# Altium schematic symbol library Robert_.SchLib: 177 symbols (part 6 of 6)
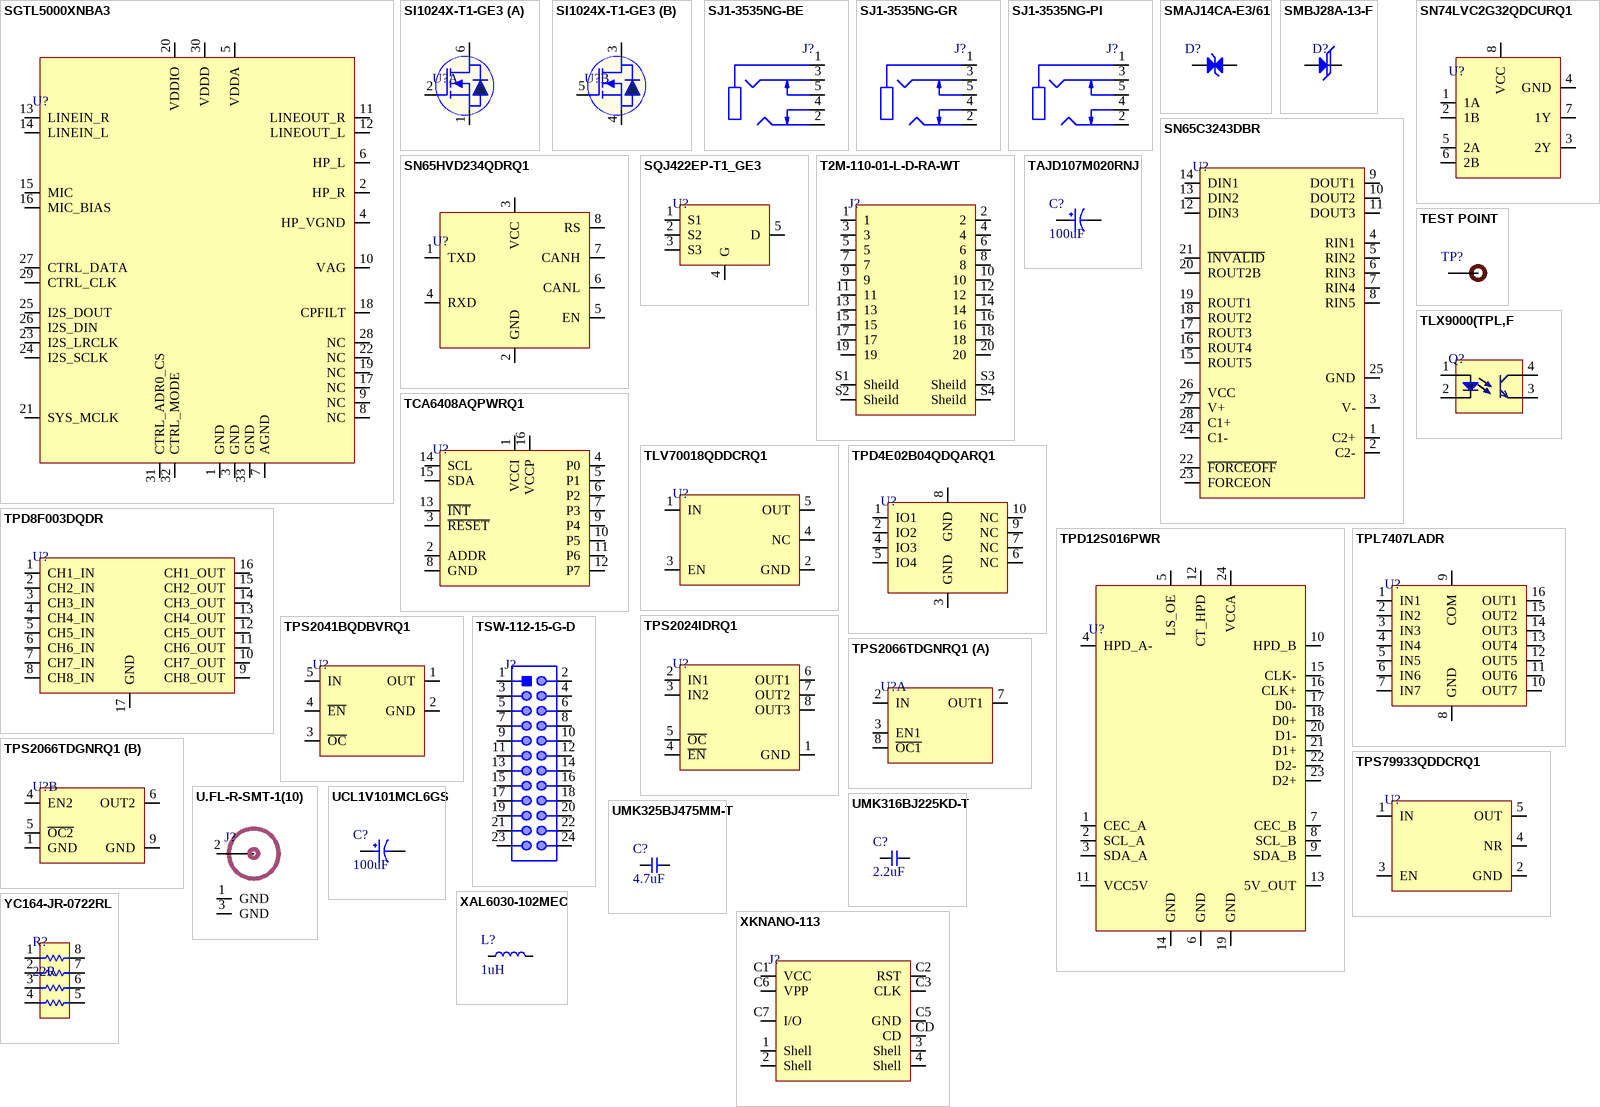
[diagram p11: symbols SGTL5000XNBA3 to YC164-JR-0722RL]

## TSW-112-15-G-D
designator J?
CONN HEADER VERT 24POS 2.54MM; Manufacturer: Samtec; Manufacturer Part Number: TSW-112-15-G-D; Supplier: Digi-Key; Supplier Part Number: SAM12353-ND; RoHS: Yes; Category: Connectors; Stock: 706; Pricing: 1=4.12, 10=3.737, 100=3.2926, 500=2.79872, 1000=2.38714 (USD); ComponentLink1URL: http://www.farnell.com/datasheets/2060109.pdf?src-supplier=Farnell; ComponentLink1Description: http://www.farnell.com/datasheets/2060109.pdf?src-supplier=Farnell; ComponentLink2URL: http://suddendocs.samtec.com/prints/tsw-xxx-xx-xxx-x-xx-xxx-mkt.pdf?src-supplier=Digi-Key; ComponentLink2Description: http://suddendocs.samtec.com/prints/tsw-xxx-xx-xxx-x-xx-xxx-mkt.pdf?src-supplier=Digi-Key; ComponentLink3URL: https://datasheet.octopart.com/TSW-112-15-G-D-Samtec-datasheet-97325576.pdf?src-supplier=Sager+Electronics; ComponentLink3Description: https://datasheet.octopart.com/TSW-112-15-G-D-Samtec-datasheet-97325576.pdf?src-supplier=Sager+Electronics
footprint TSW-112-15-G-D
pins: 1, 2, 3, 4, 5, 6, 7, 8, 9, 10, 11, 12, 13, 14, 15, 16, 17, 18, 19, 20, 21, 22, 23, 24

## U.FL-R-SMT-1(10)
designator J?
CONN U.FL RCPT STR 50 OHM SMD; Manufacturer: Hirose; Manufacturer Part Number: U.FL-R-SMT-1(10); Body Material: Bronze; Body Plating: Silver; Dielectric Material: Polymer; Center Contact Plating: Gold; Impedance: 50R; Connector Type: Receptacle,Male Pin; Clock Frequency: 6GHz; Insulation Resistance: 500MR; Number of Ports: 1; Mating Cycles: 30; Supplier: Future Electronics; Supplier Part Number: 5324728; RoHS: Yes; Category: RF / Coaxial Connectors; Stock: 200000; Pricing: 2500=1.24 (USD); Mounting Technology: Surface Mount; Contact Material: Brass; Housing Color: Beige; Weight: 0.001764oz; Min Operating Temperature: -40°C; Max Operating Temperature: 90°C; Packaging: Tape and Reel; Package Quantity: 2500; Fastening Type: SNAP-ON; Termination: Solder; Orientation: Straight; Series: U.FL; Lead Free: Lead Free; RoHS Compliant: Yes; ComponentLink1URL: https://datasheet.ciiva.com/11762/0900766b8105243f-11762474.pdf?src-supplier=Rs; ComponentLink1Description: https://datasheet.ciiva.com/11762/0900766b8105243f-11762474.pdf?src-supplier=Rs; ComponentLink2URL: https://datasheet.ciiva.com/7651/91524-7651914.pdf?src-supplier=Element14; ComponentLink2Description: https://datasheet.ciiva.com/7651/91524-7651914.pdf?src-supplier=Element14; ComponentLink3URL: https://datasheet.ciiva.com/7651/91524-7651915.pdf?src-supplier=Element14; ComponentLink3Description: https://datasheet.ciiva.com/7651/91524-7651915.pdf?src-supplier=Element14
footprint U.FL-R-SMT-1(10)
pins: 1 GND, 2 Sig, 3 GND

## UCL1V101MCL6GS
designator C?, comment 100uF
CAP ALUM 100UF 20% 35V SMD; Manufacturer: Nichicon; Manufacturer Part Number: UCL1V101MCL6GS; Supplier: Arrow Electronics; Supplier Part Number: UCL1V101MCL6GS; RoHS: Yes; Category: Aluminum Electrolytic Capacitors; Stock: 31500; Pricing: 900=0.2113, 1800=0.1923, 4500=0.1719, 9900=0.1694 (USD); ComponentLink1URL: https://datasheet.ciiva.com/97/e-cl-97672.pdf?src-supplier=Digi-Key; ComponentLink1Description: https://datasheet.ciiva.com/97/e-cl-97672.pdf?src-supplier=Digi-Key; ComponentLink2URL: https://datasheet.ciiva.com/97/e-cl-97673.pdf?src-supplier=Digi-Key; ComponentLink2Description: https://datasheet.ciiva.com/97/e-cl-97673.pdf?src-supplier=Digi-Key; ComponentLink3URL: https://datasheet.ciiva.com/97/e-cl-97674.pdf?src-supplier=Digi-Key; ComponentLink3Description: https://datasheet.ciiva.com/97/e-cl-97674.pdf?src-supplier=Digi-Key; ComponentLink4URL: https://datasheet.ciiva.com/11684/e-cl-11684893.pdf?src-supplier=Avnet; ComponentLink4Description: https://datasheet.ciiva.com/11684/e-cl-11684893.pdf?src-supplier=Avnet; ComponentLink5URL: https://datasheet.ciiva.com/7793/e-cl-7793209.pdf?src-supplier=Element14; ComponentLink5Description: https://datasheet.ciiva.com/7793/e-cl-7793209.pdf?src-supplier=Element14
footprint UCL1V101MCL6GS
pins: 1, 2

## UMK316BJ225KD-T
designator C?, comment 2.2uF
CAP CER 2.2UF 50V X5R 1206; Manufacturer: Taiyo Yuden; Manufacturer Part Number: UMK316BJ225KD-T; Item Type: Capacitor; Supplier: Avnet; Supplier Part Number: UMK316BJ225KD-T; RoHS: Yes; Category: Ceramic Capacitors; Stock: 328000; Pricing: 4000=0.02842 (USD); ComponentLink1URL: https://datasheet.ciiva.com/170/umk316bj225kd-t-ss-170103.pdf?src-supplier=Digi-Key; ComponentLink1Description: https://datasheet.ciiva.com/170/umk316bj225kd-t-ss-170103.pdf?src-supplier=Digi-Key; ComponentLink2URL: https://datasheet.ciiva.com/11597/umk316bj225kd-t-ss-11597392.pdf?src-supplier=Avnet; ComponentLink2Description: https://datasheet.ciiva.com/11597/umk316bj225kd-t-ss-11597392.pdf?src-supplier=Avnet; ComponentLink3URL: https://datasheet.ciiva.com/30118/213umk316bj225kd-t-30118590.pdf?src-supplier=Onlinecomponents.com; ComponentLink3Description: https://datasheet.ciiva.com/30118/213umk316bj225kd-t-30118590.pdf?src-supplier=Onlinecomponents.com; ComponentLink4URL: https://datasheet.ciiva.com/15922/165umk316bj225kd-t-15922688.pdf?src-supplier=Onlinecomponents.com; ComponentLink4Description: https://datasheet.ciiva.com/15922/165umk316bj225kd-t-15922688.pdf?src-supplier=Onlinecomponents.com; ComponentLink5URL: https://datasheet.ciiva.com/22694/1497285-22694280.pdf?src-supplier=Element14; ComponentLink5Description: https://datasheet.ciiva.com/22694/1497285-22694280.pdf?src-supplier=Element14; ComponentLink6URL: https://datasheet.ciiva.com/46394/1910934-46394314.pdf?src-supplier=Element14; ComponentLink6Description: https://datasheet.ciiva.com/46394/1910934-46394314.pdf?src-supplier=Element14; ComponentLink7URL: https://datasheet.ciiva.com/7975/1497285-7975563.pdf?src-supplier=Element14; ComponentLink7Description: https://datasheet.ciiva.com/7975/1497285-7975563.pdf?src-supplier=Element14; ComponentLink8URL: https://datasheet.ciiva.com/7975/mlcc-all-e-7975919.pdf?src-supplier=Element14; ComponentLink8Description: https://datasheet.ciiva.com/7975/mlcc-all-e-7975919.pdf?src-supplier=Element14
footprint Cap-1206 (SMD 1206)
pins: 1, 2

## UMK325BJ475MM-T
designator C?, comment 4.7uF
CAP CER 4.7UF 50V X5R 1210; Manufacturer: Taiyo Yuden; Manufacturer Part Number: UMK325BJ475MM-T; Item Type: Capacitor; Supplier: Avnet; Supplier Part Number: UMK325BJ475MM-T; RoHS: Yes; Category: Ceramic Capacitors; Stock: 1000; Pricing: 500=0.20859, 1000=0.20368, 2000=0.19877, 3000=0.19387, 4000=0.18896, 5000=0.18405, 50000=0.14658 (USD); ComponentLink1URL: https://datasheet.ciiva.com/15922/567umk325bj475mm-t-15922663.pdf?src-supplier=Onlinecomponents.com; ComponentLink1Description: https://datasheet.ciiva.com/15922/567umk325bj475mm-t-15922663.pdf?src-supplier=Onlinecomponents.com; ComponentLink2URL: https://datasheet.ciiva.com/141/umk325bj475mm-t-ss-141584.pdf?src-supplier=Digi-Key; ComponentLink2Description: https://datasheet.ciiva.com/141/umk325bj475mm-t-ss-141584.pdf?src-supplier=Digi-Key; ComponentLink3URL: https://datasheet.ciiva.com/7975/mlcc-all-e-7975927.pdf?src-supplier=Element14; ComponentLink3Description: https://datasheet.ciiva.com/7975/mlcc-all-e-7975927.pdf?src-supplier=Element14; ComponentLink4URL: https://datasheet.ciiva.com/30093/548umk325bj475mm-t-30093083.pdf?src-supplier=Onlinecomponents.com; ComponentLink4Description: https://datasheet.ciiva.com/30093/548umk325bj475mm-t-30093083.pdf?src-supplier=Onlinecomponents.com
footprint Cap-1210 (SMD 1210)
pins: 1, 2

## XAL6030-102MEC
designator L?, comment 1uH
Power Inductors - SMD 1uH Shld 20% 18A 6.18mOhms AECQ2; Manufacturer: Coilcraft; Manufacturer Part Number: XAL6030-102MEC; Core Material: Composite; Shielding: Shielded; Self Resonant Frequency: 50MHz; Test Frequency: 100kHz; Saturation Current: 23A; Supplier: Mouser; Supplier Part Number: 994-XAL6030-102MEC; RoHS: Yes; Category: Fixed Inductors; Stock: 25410; Pricing: 1=3.1, 10=3.1, 50=3.1, 100=3.1, 1000=1.82, 10000=1.66 (USD); Mounting Technology: Surface Mount; Case/Package: SMD/SMT; Min Operating Temperature: -40°C; Max Operating Temperature: 125°C; Packaging: Tape and Reel; Package Quantity: 400; Tolerance: 20%; Value: 1uH; Max DC Current: 18A; Termination: SMD/SMT; Series: XAL6030; Inductance Tolerance: 20%; RMS Current (Irms): 18A; Length: 6.76mm; Width: 6.56mm; Height: 3.1mm; Lead Free: Contains Lead; RoHS Compliant: Yes; Reach SVHC Compliant: No; ComponentLink1URL: https://datasheet.ciiva.com/22680/1681993-22680376.pdf?src-supplier=Element14; ComponentLink1Description: https://datasheet.ciiva.com/22680/1681993-22680376.pdf?src-supplier=Element14; ComponentLink2URL: https://datasheet.ciiva.com/22680/1681993-22680375.pdf?src-supplier=Element14; ComponentLink2Description: https://datasheet.ciiva.com/22680/1681993-22680375.pdf?src-supplier=Element14; ComponentLink3URL: https://datasheet.ciiva.com/13277/xal60xx-270658-13277255.pdf?src-supplier=Mouser; ComponentLink3Description: https://datasheet.ciiva.com/13277/xal60xx-270658-13277255.pdf?src-supplier=Mouser
footprint XAL6030-102MEC
pins: 1, 2

## XKNANO-113
designator J?
Copper Alloy Self bomb Gold plating 1.25mm Deck -40℃~+85℃ 260℃ NanoSIM SMD SIM Card Connectors ROHS; Manufacturer: XKB Connectivity; Manufacturer Part Number: XKNANO-113; Package: SMD Custom; LCSC Part Number: C381071; Item Type: SIM Card Connectors; ComponentLink1Description: LCSC; ComponentLink1URL: https://www.lcsc.com/product-detail/SIM-Card-Connectors_XKB-Connectivity-XKNANO-113_C381071.html
footprint XKNANO-113
pins: 1 Shell, 2 Shell, 3 Shell, 4 Shell, C1 VCC, C2 RST, C3 CLK, C5 GND, C6 VPP, C7 I/O, CD

## YC164-JR-0722RL
designator R?, comment 22R
RES ARRAY 4 RES 22 OHM 1206; Manufacturer: Yageo; Manufacturer Part Number: YC164-JR-0722RL; Supplier: Future Electronics; Supplier Part Number: 4472155; RoHS: Yes; Category: Resistor Arrays; Stock: 225000; Pricing: 5000=0.0084, 20000=0.008, 50000=0.0078, 125000=0.0075, 200000=0.0071 (USD); ComponentLink1URL: https://datasheet.ciiva.com/8018/443424-8018007.pdf?src-supplier=Element14; ComponentLink1Description: https://datasheet.ciiva.com/8018/443424-8018007.pdf?src-supplier=Element14; ComponentLink2URL: https://datasheet.ciiva.com/8018/443424-8018008.pdf?src-supplier=Element14; ComponentLink2Description: https://datasheet.ciiva.com/8018/443424-8018008.pdf?src-supplier=Element14; ComponentLink3URL: https://datasheet.ciiva.com/2688/pyu-yc-tc164-51-rohs-l-3-2688422.pdf?src-supplier=Digi-Key; ComponentLink3Description: https://datasheet.ciiva.com/2688/pyu-yc-tc164-51-rohs-l-3-2688422.pdf?src-supplier=Digi-Key; ComponentLink4URL: https://datasheet.ciiva.com/2688/pyu-yc-tc164-51-rohs-l-3-2688421.pdf?src-supplier=Digi-Key; ComponentLink4Description: https://datasheet.ciiva.com/2688/pyu-yc-tc164-51-rohs-l-3-2688421.pdf?src-supplier=Digi-Key; ComponentLink5URL: https://datasheet.ciiva.com/8320/pyu-yc-tc164-51-rohs-l-3-8320230.pdf?src-supplier=Avnet; ComponentLink5Description: https://datasheet.ciiva.com/8320/pyu-yc-tc164-51-rohs-l-3-8320230.pdf?src-supplier=Avnet; ComponentLink6URL: https://datasheet.ciiva.com/2688/pyu-yc-tc164-51-rohs-l-3-2688423.pdf?src-supplier=Digi-Key; ComponentLink6Description: https://datasheet.ciiva.com/2688/pyu-yc-tc164-51-rohs-l-3-2688423.pdf?src-supplier=Digi-Key; ComponentLink7URL: https://datasheet.ciiva.com/17030/pyu-yc-tc164-51-rohs-l-3-17030158.pdf?src-supplier=Future+Electronics; ComponentLink7Description: https://datasheet.ciiva.com/17030/pyu-yc-tc164-51-rohs-l-3-17030158.pdf?src-supplier=Future+Electronics; ComponentLink8URL: https://datasheet.ciiva.com/28379/pyu-yc-tc164-51-rohs-l-3-28379358.pdf?; ComponentLink8Description: https://datasheet.ciiva.com/28379/pyu-yc-tc164-51-rohs-l-3-28379358.pdf?
footprint YC164-JR-0722RL
pins: 1, 2, 3, 4, 5, 6, 7, 8